# Altium footprint library 后改2025底板线路板图.PcbLib: 53 footprints (part 1 of 4)
Each footprint in its own frame and in the unit in brackets; x right, y up, seen from the top. Pads: shape width x height; smd on the part's side, far side on the other; paste and mask are expansions set on the pad; w line width, h text height; cw(c..) or ccw(c..) is an arc to the next point about the centre after c.
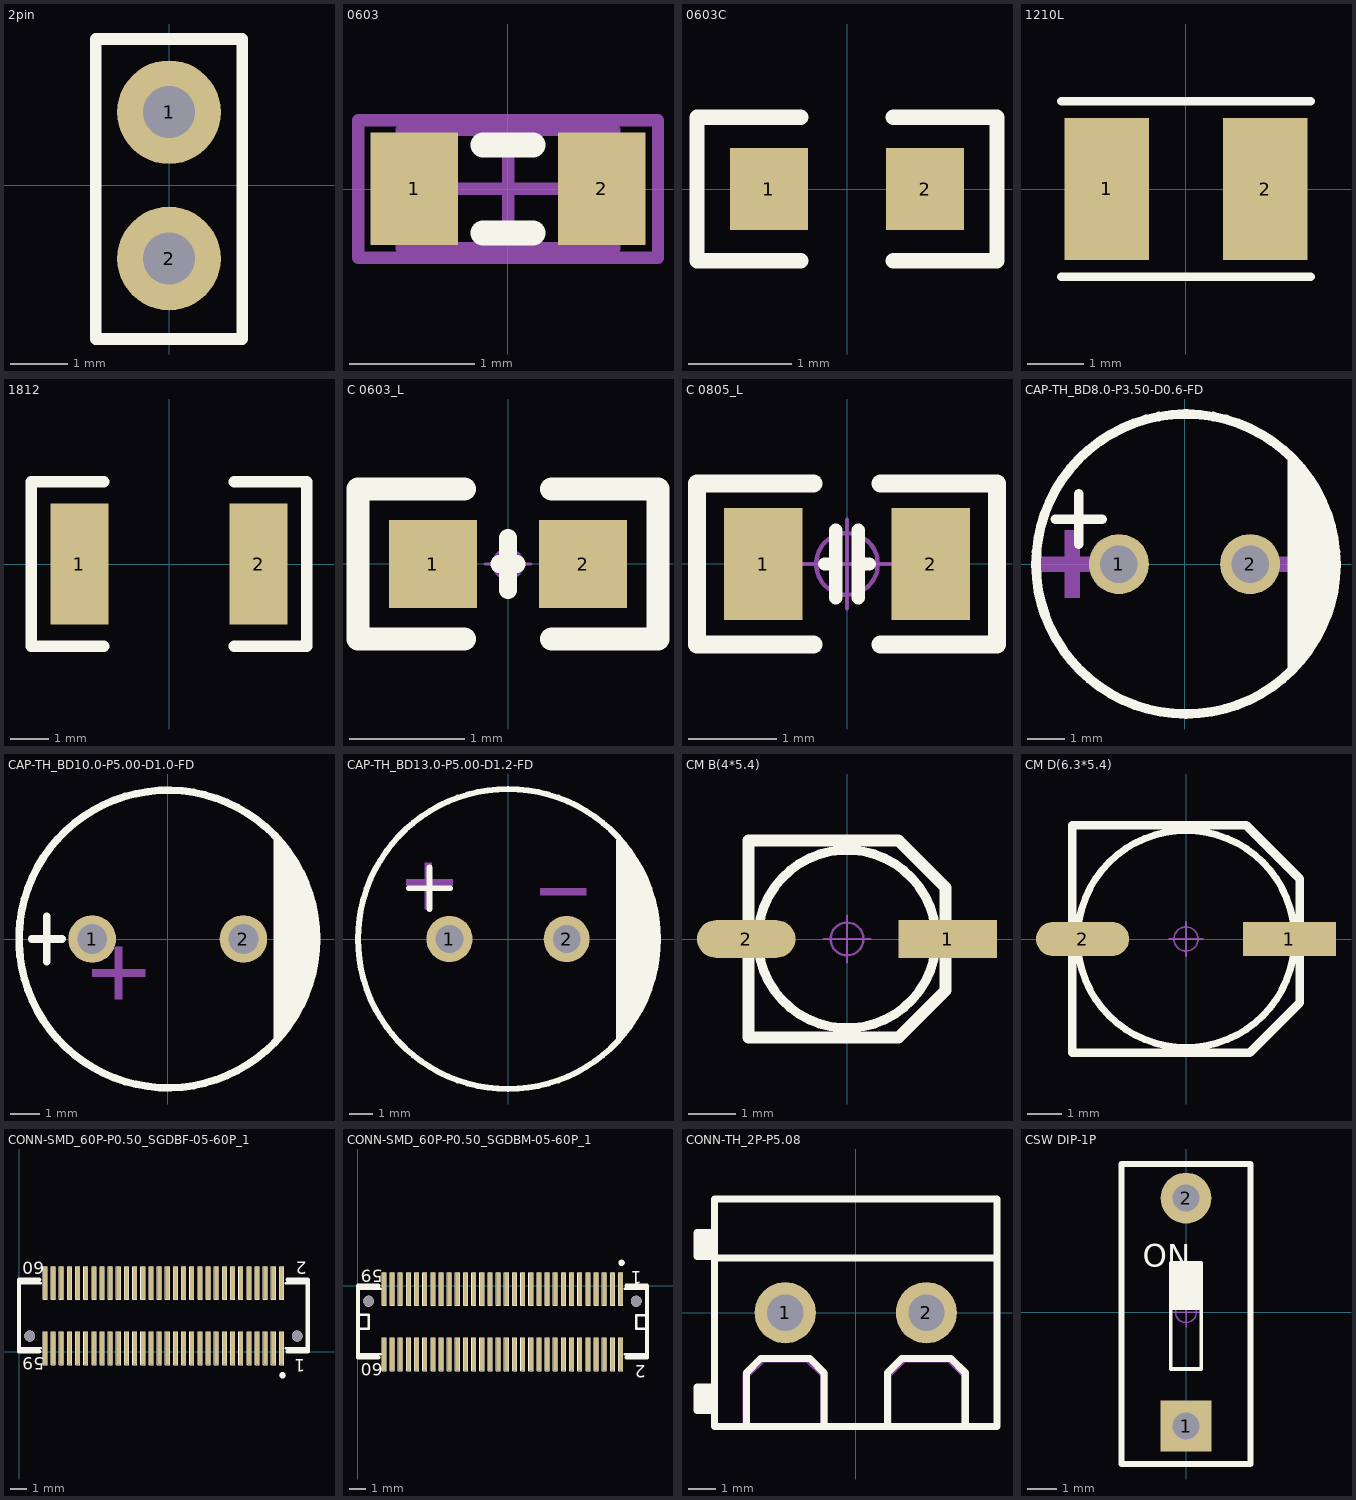
[diagram p0: the footprints below, top view; thin cyan lines are the x and y axes]

## 2pin [mm]
height 10
pads (2):
  round 1.8 hole 0.9: 1(0,1.27) 2(0,-1.27)
Top Overlay:
  lines w0.203: -1.27,-2.667 1.27,-2.667 1.27,2.54 -1.27,2.54 -1.27,-2.667

## 0603 [mm]
pads (2):
  rect 0.7x0.9 smd: 1(-0.75,0) 2(0.75,0)
Top Overlay:
  lines w0.2: -0.2,-0.35 0.2,-0.35 ; -0.2,0.35 0.2,0.35
Mechanical 13:
  lines w0.1: -0.85,-0.475 0.85,-0.475 0.85,0.475 -0.85,0.475 -0.85,-0.475
Mechanical 15:
  lines w0.1: -0.475,0 0.475,0 ; 0,-0.475 0,0.475 ; -1.2,-0.55 1.2,-0.55 1.2,0.55 -1.2,0.55 -1.2,-0.55
3D body "R 0603.STEP": height 0.4, standoff 0, extent -0.825,-0.4 0.775,0.4

## 0603C [mm]
pads (2):
  rect 0.76x0.8 smd: 1(-0.76,0) 2(0.76,0)
Top Overlay:
  lines w0.15: -0.45,-0.7 -1.46,-0.7 -1.46,0.7 -0.45,0.7 ; 0.45,-0.7 1.46,-0.7 1.46,0.7 0.45,0.7

## 1210L [mm]
pads (2):
  rect 1.5x2.5 smd: 1(-1.4,0) 2(1.4,0)
Top Overlay:
  lines w0.15: -2.2,-1.55 2.2,-1.55 ; -2.2,1.55 2.2,1.55

## 1812 [mil]
pads (2):
  rect 60x125 smd: 1(-92.5,0) 2(92.5,0)
Top Overlay:
  lines w12: -67.5,-85 -142.5,-85 -142.5,85 -67.5,85 ; 67.5,-85 142.5,-85 142.5,85 67.5,85
3D body "R 1812.STEP": height 21.69, standoff -0.47, extent -86.58,-63.99 90.59,61.99

## C 0603_L [mil] "无极性贴片电容                                       淘宝ID:黄晶宝石"
pads (2):
  rect 30x30 smd: 1(-25.59,0) 2(25.59,0)
Top Overlay:
  lines w6: -3,0 0,0 3,0 ; 0,-9 0,9
  lines w8: -15,-25.59 -51.18,-25.59 -51.18,25.59 -15,25.59 ; 15,-25.59 51.18,-25.59 51.18,25.59 15,25.59
Mechanical 15:
  circle w1: c0,0 r5
  lines w1: -7.87,0 7.87,0 ; 0,-7.87 0,7.87
3D body "C 0603.STEP": height 31.89, standoff -0.39, extent -31.5,-16.14 31.5,16.14

## C 0805_L [mil] "无极性贴片电容                                        淘宝ID:黄晶宝石"
height 19.68
pads (2):
  rect 35x50 smd: 1(-37.4,0) 2(37.4,0)
Top Overlay:
  lines w6: -10,0 -5,0 ; -5,-15 -5,15 ; 5,-15 5,15 ; 5,0 10,0
  lines w8: -15,-36 -66.93,-36 -66.93,36 -15,36 ; 15,-36 66.93,-36 66.93,36 15,36
Mechanical 15:
  circle w1.97: c0,0 r13.78
  circle w1.97: c0,0 r13.78
  lines w1.97: -19.68,0 19.68,0 -19.68,0 ; 0,-19.68 0,19.68 0,-19.68
3D body "C 0805.STEP": height 20.08, standoff -0.39, extent -39.37,-24.02 39.37,24.02

## CAP-TH_BD8.0-P3.50-D0.6-FD [mm]
pads (2):
  round 1.6 hole 1: 1(-1.75,0) 2(1.75,0)
Top Overlay:
  region: 2.75,-3 2.941,-2.8 3.268,-2.355 3.536,-1.872 3.741,-1.359 3.88,-0.824 3.95,-0.276 3.95,0.276 3.88,0.824 3.741,1.359 3.536,1.872 3.268,2.355 2.941,2.8 2.75,3
  lines w0.254: -3.445,1.2 -2.2,1.2 ; -2.822,0.527 -2.822,1.873 ; 0.003,4.001 ccw(c0.038,0.001) 0.074,4.001
Mechanical 15:
  region: -3.2,0.5 -3.2,-0.9 -2.8,-0.9 -2.8,0.7 -2.8,0.9 -3.2,0.9
  region: -2.5,0.2 -3.9,0.2 -3.9,-0.2 -2.3,-0.2 -2.1,-0.2 -2.1,0.2
  region: 3.5,0.2 2.1,0.2 2.1,-0.2 3.7,-0.2 3.9,-0.2 3.9,0.2

## CAP-TH_BD10.0-P5.00-D1.0-FD [mm]
pads (2):
  round 1.6 hole 1: 1(-2.54,0) 2(2.54,0)
Top Overlay:
  circle w0.254: c0,0 r5
  region: 3.556,3.556 3.556,-3.556 4.318,-2.54 4.826,-1.016 5.08,0.508 4.826,1.524
  lines w0.254: -4.572,0 -3.556,0 ; -4.064,-0.762 -4.064,0.762
Mechanical 15:
  region: -1.778,-0.762 -1.778,-2.032 -1.524,-2.032 -1.524,-0.254 -1.778,-0.254
  region: -2.54,-1.016 -0.762,-1.016 -0.762,-1.27 -2.54,-1.27

## CAP-TH_BD13.0-P5.00-D1.2-FD [mm]
pads (2):
  round 2 hole 1.2: 1(-2.54,0) 2(2.54,0)
Top Overlay:
  circle w0.254: c-0.001,0 r6.5
  region: 4.7,4.3 4.7,-4.5 5.8,-3 6.3,-1.7 6.4,-0.5 6.3,1.5 5.7,3.2
  lines w0.254: -4.301,2.2 -2.501,2.2 ; -3.401,1.3 -3.401,3.1
Mechanical 15:
  region: 4.72,4.286 4.72,-4.514 5.82,-3.014 6.32,-1.714 6.42,-0.514 6.32,1.486 5.72,3.186
  region: -4.4,2.6 -2.5,2.6 -2.4,2.6 -2.4,2.5 -2.4,2.3 -4.4,2.3
  region: -3.6,1.3 -3.6,3.2 -3.6,3.3 -3.5,3.3 -3.3,3.3 -3.3,1.3
  region: 1.4,2.2 3.3,2.2 3.4,2.2 3.4,2.1 3.4,1.9 1.4,1.9

## CM B(4*5.4) [mm] "贴片电解电容，直径4mm，高5.4mm          淘宝ID:黄晶宝石"
pads (2):
  rect 2.1x0.8 smd: 1(2.15,0)
  oval 2.1x0.8 smd: 2(-2.15,0)
Top Overlay:
  circle w0.2: c0,0 r1.9
  lines w0.254: -2.1,-2.1 -2.1,2.1 1.1,2.1 2.1,1.1 2.1,-1.1 1.1,-2.1 -2.1,-2.1
Mechanical 15:
  circle w0.05: c0,0 r0.35
  lines w0.05: -0.5,0 0.5,0 ; 0,-0.5 0,0.5
3D body "CM B(4X5.4).STEP": height 5.4, standoff -0.01, extent -2.3,-2.125 2.3,2.175

## CM D(6.3*5.4) [mm] "贴片电解电容，直径6.3mm，高5.4mm           淘宝ID:黄晶宝石"
height 5.4
pads (2):
  rect 2.7x1 smd: 1(3,0)
  oval 2.7x1 smd: 2(-3,0)
Top Overlay:
  circle w0.2: c0,0 r3.15
  lines w0.254: -3.3,-3.3 1.85,-3.3 3.3,-1.85 3.3,1.75 1.75,3.3 -3.3,3.3 -3.3,-3.3
Mechanical 15:
  circle w0.05: c0,0 r0.35
  lines w0.05: -0.5,0 0.5,0 ; 0,-0.5 0,0.5
3D body "CM D(6.3X5.4).STEP": height 5.4, standoff -0.01, extent -3.5,-3.3 3.5,3.3

## CONN-SMD_60P-P0.50_SGDBF-05-60P_1 [mm]
pads (63):
  rect 0.25x2 smd paste+0 mask+0.051: 1(16.1,0.2) 2(16.1,4.2) 3(15.6,0.2) 4(15.6,4.2) 5(15.1,0.2) 6(15.1,4.2) 7(14.6,0.2) 8(14.6,4.2) 9(14.1,0.2) 10(14.1,4.2) 11(13.6,0.2) 12(13.6,4.2) 13(13.1,0.2) 14(13.1,4.2) 15(12.6,0.2) 16(12.6,4.2) 17(12.1,0.2) 18(12.1,4.2) 19(11.6,0.2) 20(11.6,4.2) 21(11.1,0.2) 22(11.1,4.2) 23(10.6,0.2) 24(10.6,4.2) 25(10.1,0.2) 26(10.1,4.2) 27(9.6,0.2) 28(9.6,4.2) 29(9.1,0.2) 30(9.1,4.2) 31(8.6,0.2) 32(8.6,4.2) 33(8.1,0.2) 34(8.1,4.2) 35(7.6,0.2) 36(7.6,4.2) 37(7.1,0.2) 38(7.1,4.2) 39(6.6,0.2) 40(6.6,4.2) 41(6.1,0.2) 42(6.1,4.2) 43(5.6,0.2) 44(5.6,4.2) 45(5.1,0.2) 46(5.1,4.2) 47(4.6,0.2) 48(4.6,4.2) 49(4.1,0.2) 50(4.1,4.2) 51(3.6,0.2) 52(3.6,4.2) 53(3.1,0.2) 54(3.1,4.2) 55(2.6,0.2) 56(2.6,4.2) 57(2.1,0.2) 58(2.1,4.2) 59(1.6,0.2) 60(1.6,4.2)
  round 0.4 on Top Overlay: 1(16.15,-1.45)
  round 0.65 hole 0.65 unplated paste-2539.97: ""(0.65,0.95) ""(17.05,0.95)
Top Overlay:
  drawing of 254 lines, arcs and shapes, not listed
  text "1" at 17.541,-0.476 h0.76
  text "2" at 17.626,5.493 h0.76
  text "60" at 1.535,5.493 h0.76
  text "59" at 1.535,-0.349 h0.76
Mechanical 15:
  circle w0.25: c17.05,0.95 r0.125
  circle w0.25: c0.65,0.95 r0.125

## CONN-SMD_60P-P0.50_SGDBM-05-60P_1 [mm]
pads (63):
  rect 0.25x2 smd paste+0 mask+0.051: 1(16.113,-0.2) 2(16.113,-4.2) 3(15.613,-0.2) 4(15.613,-4.2) 5(15.113,-0.2) 6(15.113,-4.2) 7(14.613,-0.2) 8(14.613,-4.2) 9(14.113,-0.2) 10(14.113,-4.2) 11(13.613,-0.2) 12(13.613,-4.2) 13(13.113,-0.2) 14(13.113,-4.2) 15(12.613,-0.2) 16(12.613,-4.2) 17(12.113,-0.2) 18(12.113,-4.2) 19(11.613,-0.2) 20(11.613,-4.2) 21(11.113,-0.2) 22(11.113,-4.2) 23(10.613,-0.2) 24(10.613,-4.2) 25(10.113,-0.2) 26(10.113,-4.2) 27(9.613,-0.2) 28(9.613,-4.2) 29(9.113,-0.2) 30(9.113,-4.2) 31(8.613,-0.2) 32(8.613,-4.2) 33(8.113,-0.2) 34(8.113,-4.2) 35(7.613,-0.2) 36(7.613,-4.2) 37(7.113,-0.2) 38(7.113,-4.2) 39(6.613,-0.2) 40(6.613,-4.2) 41(6.113,-0.2) 42(6.113,-4.2) 43(5.613,-0.2) 44(5.613,-4.2) 45(5.113,-0.2) 46(5.113,-4.2) 47(4.613,-0.2) 48(4.613,-4.2) 49(4.113,-0.2) 50(4.113,-4.2) 51(3.613,-0.2) 52(3.613,-4.2) 53(3.113,-0.2) 54(3.113,-4.2) 55(2.613,-0.2) 56(2.613,-4.2) 57(2.113,-0.2) 58(2.113,-4.2) 59(1.613,-0.2) 60(1.613,-4.2)
  round 0.4 on Top Overlay: 1(16.163,1.4)
  round 0.65 hole 0.65 unplated paste-2539.97: ""(0.663,-0.95) ""(17.063,-0.95)
Top Overlay:
  drawing of 260 lines, arcs and shapes, not listed
  text "59" at 1.545,0.97 h0.76
  text "1" at 17.387,0.9 h0.76
  text "60" at 1.545,-4.745 h0.76
  text "2" at 17.636,-4.872 h0.76
Mechanical 15:
  circle w0.25: c0.663,-0.95 r0.125
  circle w0.25: c17.063,-0.95 r0.125

## CONN-TH_2P-P5.08 [mm]
pads (2):
  round 2.2 hole 1.3 paste-2539.97 mask+0.051: 1(-2.54,0) 2(2.54,0)
Top Overlay:
  region: -5.08,-2.667 -5.715,-2.667 -5.715,-3.524 -5.08,-3.524
  region: -5.08,2.032 -5.715,2.032 -5.715,2.889 -5.112,2.889 -5.08,2.921
  lines w0.254: -5.08,-3.524 -5.715,-3.524 -5.715,-2.667 -5.08,-2.667 ; -5.08,1.97 5.08,1.97 ; -5.08,2.032 -5.715,2.032 -5.715,2.889 -5.08,2.889 ; -4.145,-4.1 -3.937,-4.1 -3.937,-2.159 -3.429,-1.651 -1.651,-1.651 -1.143,-2.159 -1.143,-4.1 ; 0.935,-4.1 1.143,-4.1 1.143,-2.159 1.651,-1.651 3.429,-1.651 3.937,-2.159 3.937,-4.1 ; -5.08,-4.1 5.08,-4.1 5.08,4.1 -5.08,4.1 -5.08,-4.1
Mechanical 6:
  region: -1.016,-4.191 -1.016,-2.159 -1.651,-1.524 -3.429,-1.524 -4.064,-2.159 -4.064,-4.191 -3.81,-4.191 -3.81,-2.286 -3.302,-1.778 -1.778,-1.778 -1.27,-2.286 -1.27,-4.191
  region: 4.064,-4.191 4.064,-2.159 3.429,-1.524 1.651,-1.524 1.016,-2.159 1.016,-4.191 1.27,-4.191 1.27,-2.286 1.778,-1.778 3.302,-1.778 3.81,-2.286 3.81,-4.191
  region: -5.08,2.032 -5.715,2.032 -5.715,2.889 -5.112,2.889 -5.08,2.921
  region: -5.08,-2.667 -5.715,-2.667 -5.715,-3.524 -5.08,-3.524
Mechanical 15:
  region: 2.04,0.25 3.04,0.25 3.04,-0.25 2.04,-0.25
  region: -3.04,0.25 -2.04,0.25 -2.04,-0.25 -3.04,-0.25
  region: -5.02,-4.1 -5.02,-4.075 -5.055,-4.04 -5.105,-4.04 -5.14,-4.075 -5.14,-4.1 -5.14,-4.125 -5.105,-4.16 -5.055,-4.16 -5.02,-4.125 -5.02,-4.1
  lines w0.051: -5.08,-4.1 5.08,-4.1 5.08,4.1 -5.08,4.1 -5.08,-4.1

## CSW DIP-1P [mm] "4.1*9.9*7mm           淘宝ID:黄晶宝石"
pads (2):
  rect 1.7x1.7 hole 0.9: 1(0,-3.81)
  round 1.7 hole 0.9: 2(0,3.81)
Top Overlay:
  rectangle: -0.508,0.127 0.508,1.651
  lines w0.127: -0.508,0.127 0.508,0.127 ; -0.508,-1.905 -0.508,1.651 0.508,1.651 0.508,-1.905 -0.508,-1.905
  lines w0.2: -2.159,-5.08 -2.159,4.953 2.159,4.953 2.159,-5.08 -2.159,-5.08
  text "ON" at -1.439,1.524 h0.76
Mechanical 15:
  circle w0.05: c0,0 r0.35
  lines w0.05: -0.5,0 0.5,0 ; 0,-0.5 0,0.5
3D body "CSW DIP-1P.STEP": height 6.65, standoff -3.15, extent -2.05,-4.95 2.05,4.95